# Altium schematic symbol library ADS131M08IPBS.SchLib: 1 symbol
Pins are listed as number, name and electrical type; pins without a type are passive.

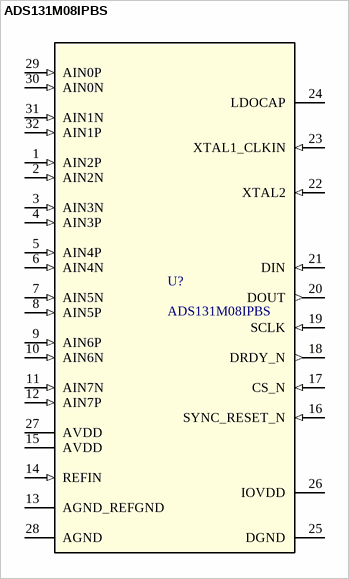
[diagram p0: symbol ADS131M08IPBS]

## ADS131M08IPBS
designator U?
24-bit, 32-kSPS, 8-channel, simultaneous-sampling, delta-sigma ADC 32-TQFP -40 to 125; Manufacturer_Name: Texas Instruments; TYPE: TYPE; RefDes: RefDes; Copyright: Copyright (C) 2025 Ultra Librarian. All rights reserved.; Manufacturer_Part_Number: ADS131M08IPBS
footprint PBS0032A_N
pins: 1 AIN2P (in), 2 AIN2N (in), 3 AIN3N (in), 4 AIN3P (in), 5 AIN4P (in), 6 AIN4N (in), 7 AIN5N (in), 8 AIN5P (in), 9 AIN6P (in), 10 AIN6N (in), 11 AIN7N (in), 12 AIN7P (in), 13 AGND_REFGND (power), 14 REFIN (in), 15 AVDD (power), 16 SYNC_RESET_N (in), 17 CS_N (in), 18 DRDY_N (out), 19 SCLK (in), 20 DOUT (out), 21 DIN (in), 22 XTAL2 (in), 23 XTAL1_CLKIN (in), 24 LDOCAP, 25 DGND (power), 26 IOVDD (power), 27 AVDD (power), 28 AGND (power), 29 AIN0P (in), 30 AIN0N (in), 31 AIN1N (in), 32 AIN1P (in)